# Altium schematic symbol library SS-90000-009.SchLib: 1 symbol
Pins are listed as number, name and electrical type; pins without a type are passive.

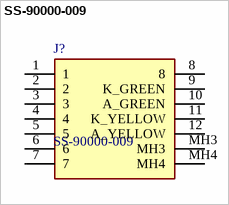
[diagram p0: symbol SS-90000-009]

## SS-90000-009
designator J?
Jack Modular Connector 8p8c (RJ45, Ethernet) 90 Angle (Right) Shielded, EMI Finger; Manufacturer_Name: Bel; Geometry.Height: 13.38mm; Mouser Part Number: *; Mouser Price/Stock: *; Manufacturer_Part_Number: SS-90000-009; Datasheet Link: https://www.belfuse.com/resources/drawings/stewartconnector/dr-STW-SS-90000-009.pdf
footprint SS90000009
pins: 1, 2, 3, 4, 5, 6, 7, 8, 9 K_GREEN, 10 A_GREEN, 11 K_YELLOW, 12 A_YELLOW, MH3, MH4